# Altium footprint library Relay.PcbLib: 36 footprints (part 1 of 3)
Each footprint in its own frame and in the unit in brackets; x right, y up, seen from the top. Pads: shape width x height; smd on the part's side, far side on the other; paste and mask are expansions set on the pad; w line width, h text height; cw(c..) or ccw(c..) is an arc to the next point about the centre after c.
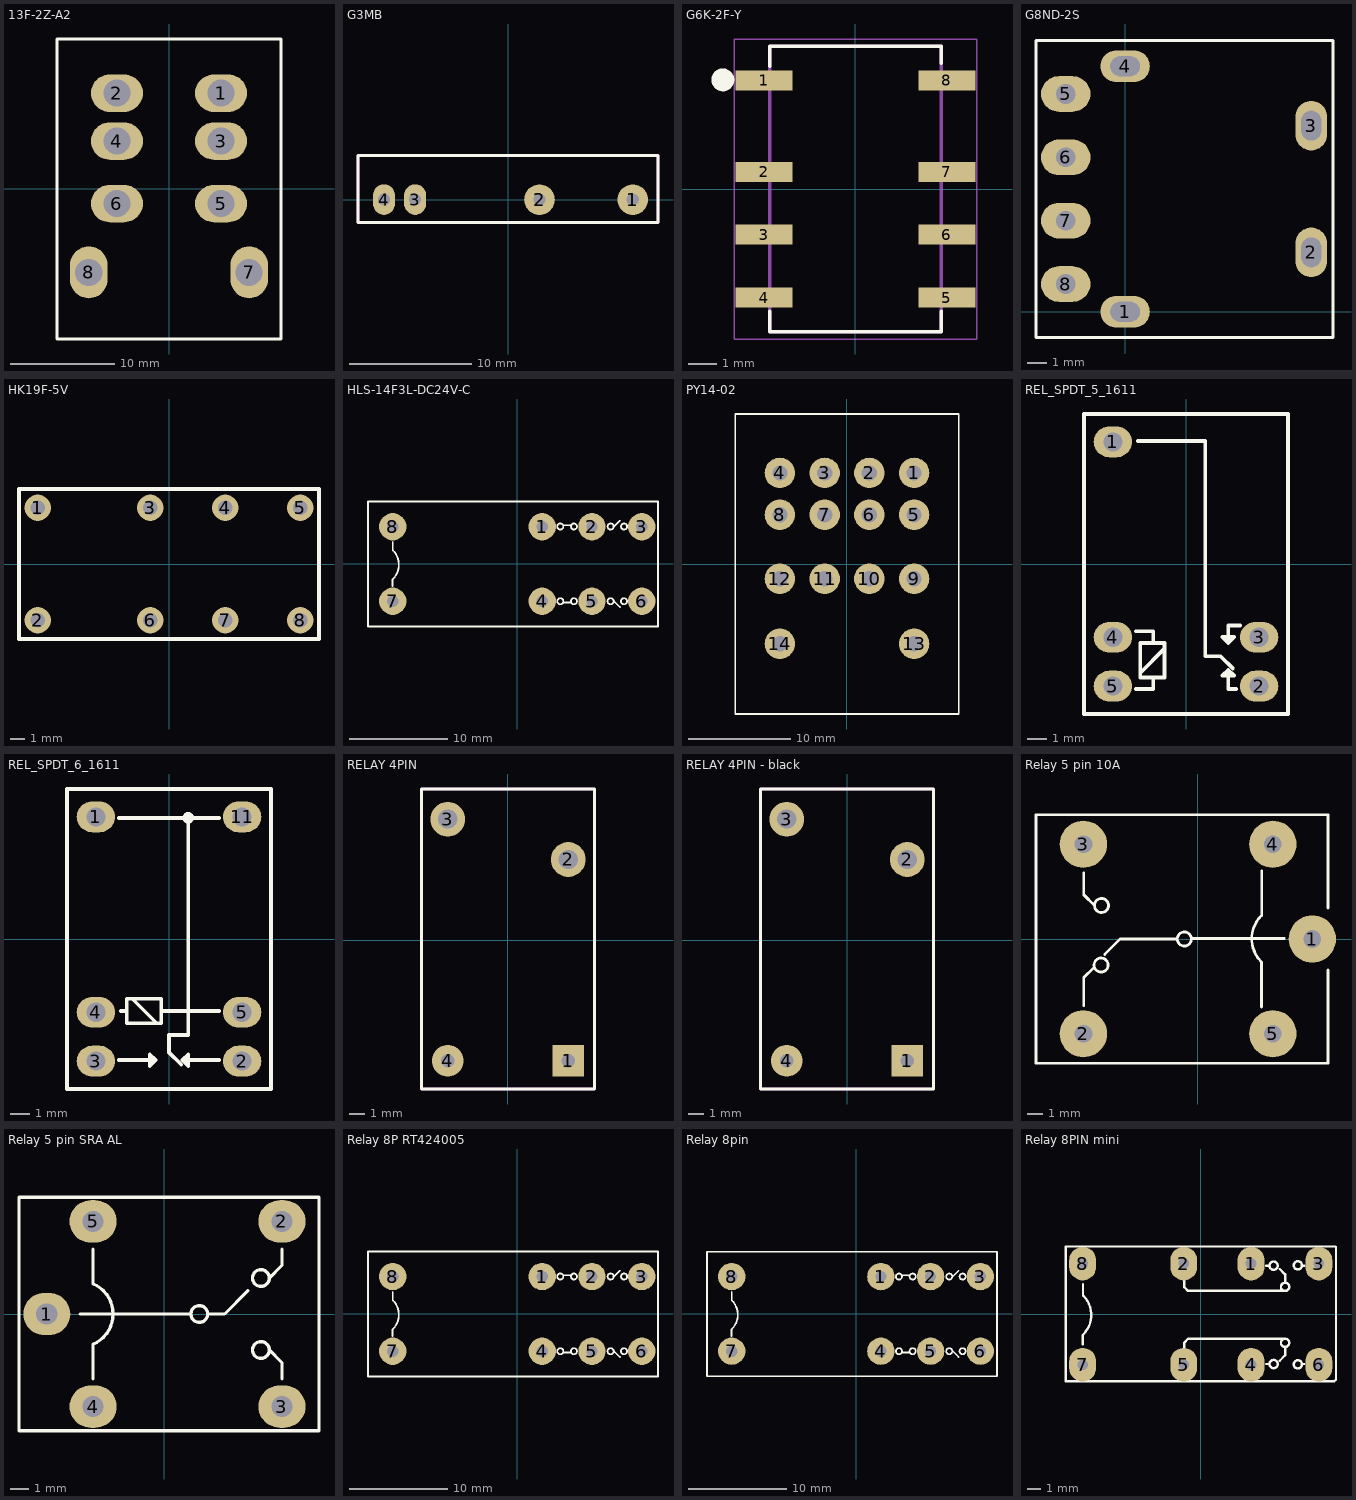
[diagram p0: the footprints below, top view; thin cyan lines are the x and y axes]

## 13F-2Z-A2 [mm]
pads (8):
  oval 5x3.6 hole 2.6: 1(5,9.2) 2(-5,9.2) 3(5,4.6) 4(-5,4.6) 5(5,-1.4) 6(-5,-1.4)
  oval 3.6x5 hole 2.6: 7(7.7,-8) 8(-7.7,-8)
Top Overlay:
  lines w0.254: -10.75,-14.4 10.75,-14.4 10.75,14.4 -10.75,14.4 -10.75,-14.4
3D body "18F-2Z-A2.stp": height 11.8, standoff 0, extent -10.8,-14.45 10.8,14.45
3D body "Omron - LY2-DC24 Relay.stp": height 47.22, standoff 5.52, extent -10.75,-14 10.75,14

## G3MB [mm] "24.5x20.5x5.5mm"
pads (4):
  round 2.5 hole 1: 1(10.16,0) 2(2.54,0)
  oval 1.8x2.5 hole 1: 3(-7.62,0) 4(-10.16,0)
Top Overlay:
  lines w0.254: -12.285,-1.885 12.215,-1.885 12.215,3.615 -12.285,3.615 -12.285,-1.885
Top Designator:
  text ".Designator" at -3.745,0.521 h1.52
Mechanical 15:
  lines w0.254: -12.285,-1.885 -12.285,3.615 12.215,3.615 12.215,-1.885 -12.285,-1.885
3D body "STD-EM-SR-00-00-03-01.SLDPRT": height 20.05, standoff -3.15, extent -12.16,-1.8 12.09,3.53

## G6K-2F-Y [mm] "G6K-2F-Y DC5 Omron Relay 1A 5V 8 PIN"
pads (8):
  rect 2x0.7 smd: 1(-3.2,3.8) 2(-3.2,0.6) 3(-3.2,-1.6) 4(-3.2,-3.8) 5(3.2,-3.8) 6(3.2,-1.6) 7(3.2,0.6) 8(3.2,3.8)
Top Overlay:
  circle w0.4: c-4.64,3.82 r0.2
  lines w0.127: -3,-4.28 -3,-5 3,-5 3,-4.28 ; -3,4.29 -3,5 3,5 3,4.4
Mechanical 13:
  lines w0.127: -3,-5 -3,5 3,5 3,-5 -3,-5
Mechanical 15:
  lines w0.05: -4.25,-5.25 -4.25,5.25 4.25,5.25 4.25,-5.25 -4.25,-5.25
3D body "G6K-2F-Y.stp": height 5.45, standoff 0, extent -3.9,-5.014 3.9,4.986

## G8ND-2S [mm]
pads (8):
  oval 2.5x1.6 hole 1 slot 1.5 at 0 deg: 1(0,0) 4(0,12.4)
  oval 1.6x2.5 hole 1 slot 1.5 at 90 deg: 2(9.4,3) 3(9.4,9.4)
  oval 2.5x1.8 hole 1: 5(-3,11) 6(-3,7.8) 7(-3,4.6) 8(-3,1.4)
Top Overlay:
  lines w0.15: -4.5,-1.3 10.5,-1.3 10.5,13.7 -4.5,13.7 -4.5,-1.3
Top Designator:
  text ".Designator" at -0.51,5.956 h1.52
3D body "g8nd-2.stp": height 13.5, standoff -3.5, extent -3.8,-0.6 10.2,13

## HK19F-5V [mil]
pads (8):
  round 70 hole 39.37: 1(-350,150) 2(-350,-150) 3(-50,150) 4(150,150) 5(350,150) 6(-50,-150) 7(150,-150) 8(350,-150)
Top Overlay:
  lines w10: -400,-200 400,-200 400,200 -400,200 -400,-200
Top Designator:
  text ".Designator" at -146.08,-13.54 h60
3D body "D2b V23105-A5 5VDC bk Relay (TE Connectivity).step": height 425.59, standoff -125.98, extent -397.63,-196.85 397.64,196.85

## HLS-14F3L-DC24V-C [mil]
height 300
pads (8):
  round 110 hole 45: 1(100,149.61) 2(300,149.61) 3(500,149.61) 4(100,-149.61) 5(300,-149.61) 6(500,-149.61) 7(-500,-149.61) 8(-500,149.61)
Top Overlay:
  circle w7: c428.76,-149.61 r12.24
  circle w7: c374.76,-149.61 r12.24
  circle w7: c227.76,-149.61 r12.24
  circle w7: c172.76,-149.61 r12.24
  circle w7: c172.76,150.39 r12.24
  circle w7: c227.76,150.39 r12.24
  circle w7: c374.76,150.39 r12.24
  circle w7: c428.76,150.39 r12.24
  lines w7: -501,-89.61 -501,-62.61 ; -500,-61.61 ccw(c-557.5,-3.11) -499,54.39 ; -500,55.39 -500,88.39 ; 187,-154.61 216,-154.61 ; 187,155.39 216,155.39 ; 388,-148.61 412,-172.61 ; 388,149.39 412,173.39 ; -599,-250.61 565.06,-250.61 565.06,250.39 -599,250.39 -599,-250.61
Top Designator:
  text ".Designator" at -163.05,-13.65 h60
3D body "Relay_TE_1-1415899-9_eec.STEP": height 620.09, standoff -140.14, extent -588.87,-252.86 552.87,247.14

## PY14-02 [mm]
pads (14):
  round 3 hole 1.5: 1(6.6,8.95) 2(2.2,8.95) 3(-2.2,8.95) 4(-6.6,8.95) 5(6.6,4.85) 6(2.2,4.85) 7(-2.2,4.85) 8(-6.6,4.85) 9(6.6,-1.45) 10(2.2,-1.45) 11(-2.2,-1.45) 12(-6.6,-1.45) 13(6.6,-7.85) 14(-6.6,-7.85)
Top Overlay:
  lines w0.15: -11,-14.75 -11,14.75 11,14.75 11,-14.75 -11,-14.75
3D body "18F-4Z-A2.stp": height 11.8, standoff 0, extent -10.8,-14.45 10.8,14.45
3D body "MY4.STEP": height 46.8, standoff 6.8, extent -10,-13.65 10,12.85

## REL_SPDT_5_1611 [mm] "RELAY, SPDT, 15.7X11X12mm, TRBS"
height 12
pads (5):
  oval 2x1.6 hole 1: 1(-3.8,6.35) 2(3.8,-6.35) 3(3.8,-3.81) 4(-3.8,-3.81) 5(-3.8,-6.35)
Top Overlay:
  lines w0.2: -2.6,-6.5 -1.7,-6.5 -1.7,-5.9 ; -2.6,-3.5 -1.7,-3.5 -1.7,-4.1 ; -2.5,6.4 1,6.4 1,-4.8 1.8,-4.8 2.435,-5.435 ; -2.379,-5.662 -1.109,-4.392 ; 2.6,-6.5 2.2,-6.5 2.2,-5.5 ; 2.8,-3.2 2.2,-3.2 2.2,-4.1 ; 2.2,-5.5 2.5,-5.8 1.9,-5.8 2.2,-5.5 ; 2.2,-4.1 1.9,-3.8 2.5,-3.8 2.2,-4.1 ; -5.3,-7.8 -5.3,7.8 5.3,7.8 5.3,-7.8 -5.3,-7.8 ; -2.379,-5.9 -1.109,-5.9 -1.109,-4.1 -2.379,-4.1 -2.379,-5.9
Top Designator:
  text ".Designator" at -3.71,-0.344 h1.52
3D body "User Library-HK4100F.step": height 11.81, standoff -2.75, extent -5.2,-7.7 5.2,7.7

## REL_SPDT_6_1611 [mm] "RELAY, SPDT, 15.7X11X12mm, HFD41, HK4100F, TRB"
height 12
pads (6):
  oval 2x1.6 hole 1: 1(-3.8,6.35) 2(3.8,-6.35) 3(-3.8,-6.35) 4(-3.8,-3.81) 5(3.8,-3.81) 11(3.8,6.35)
Top Overlay:
  circle w0.2: c1,6.3 r0.2
  lines w0.2: -2.6,-6.3 -0.7,-6.3 ; -2.6,6.3 2.6,6.3 ; -2.5,-3.744 -2.297,-3.744 ; -1.908,-3.109 -0.638,-4.379 ; -0.4,-3.744 2.6,-3.744 ; 0.635,-6.535 0,-5.9 0,-5 1,-5 1,6.3 ; 2.6,-6.3 0.7,-6.3 ; -0.7,-6.3 -1,-6 -1,-6.6 -0.7,-6.3 ; 0.7,-6.3 1,-6.6 1,-6 0.7,-6.3 ; -5.3,-7.8 -5.3,7.8 5.3,7.8 5.3,-7.8 -5.3,-7.8 ; -2.2,-4.379 -0.4,-4.379 -0.4,-3.109 -2.2,-3.109 -2.2,-4.379
Top Designator:
  text ".Designator" at -3.71,-0.344 h1.52
3D body "User Library-HK4100F.step": height 11.81, standoff -2.75, extent -5.2,-7.7 5.2,7.7

## RELAY 4PIN [mm]
pads (4):
  rect 2x2 hole 0.864: 1(3.8,-7.62)
  round 2.2 hole 1.2: 2(3.8,5.08) 3(-3.8,7.62)
  round 2 hole 0.864: 4(-3.8,-7.62)
Top Overlay:
  lines w0.2: -5.461,-9.398 -5.461,9.525 5.461,9.525 5.461,-9.398 -5.461,-9.398
Top Designator:
  lines w0.2: -5.461,-9.398 5.461,-9.398 5.461,9.525 -5.461,9.525 -5.461,-9.398
  text ".Designator" at -3.71,-0.28 h1.52
Mechanical 6:
  lines w0.2: -5.461,-9.398 5.461,-9.398 5.461,9.525 -5.461,9.525 -5.461,-9.398
3D body "RELAY_4_PIN__SONGLE_BLUE.STEP": height 15, standoff -2.3, extent -4.937,-8.937 5.063,9.063

## RELAY 4PIN - black [mm]
pads (4):
  rect 2x2 hole 0.864: 1(3.8,-7.62)
  round 2.2 hole 1.2: 2(3.8,5.08) 3(-3.8,7.62)
  round 2 hole 0.864: 4(-3.8,-7.62)
Top Overlay:
  lines w0.2: -5.461,-9.398 -5.461,9.525 5.461,9.525 5.461,-9.398 -5.461,-9.398
Top Designator:
  lines w0.2: -5.461,-9.398 5.461,-9.398 5.461,9.525 -5.461,9.525 -5.461,-9.398
  text ".Designator" at -3.71,-0.28 h1.52
Mechanical 6:
  lines w0.2: -5.461,-9.398 5.461,-9.398 5.461,9.525 -5.461,9.525 -5.461,-9.398
3D body "RELAY_4_PIN__SONGLE_BLACK.STEP": height 15, standoff -2.3, extent -4.937,-8.937 5.063,9.063

## Relay 5 pin 10A [mil] "Relay SPDT, 5 pin, 10A,W 650mil, L 800mil, H 800mil"
height 800
pads (5):
  round 120 hole 45: 1(290,0) 2(-290,-240) 3(-290,240) 4(190,240) 5(190,-240)
Top Overlay:
  circle w7: c-244.2,85 r17.8
  circle w7: c-245.2,-66 r17.8
  circle w7: c-34.2,0 r17.8
  lines w7: -289,-169 -289,-98 -263,-72 ; -289,168 -289,112 -262,85 ; -236,-39 -197,0 -54,0 ; -14,1 219,1 ; 160,-57 cw(c218.5,0.5) 161,59 ; 161,-172 161,-58 ; 162,60 162,173 ; 330,-78.78 330,-315 -410,-315 -410,315 330,315 330,78.78
Top Designator:
  text ".Designator" at -176.08,-13.54 h60
3D body "relay srd05vdc-sl-c.SLDPRT": height 594.88, standoff -173.23, extent -414.02,-295.28 334.01,295.27

## Relay 5 pin SRA AL [mil] "Relay SPDT, 5 pin, 10A,W 12.4mm, L 16mm, H 14.2mm"
height 559.06
pads (5):
  oval 100x90 hole 45: 1(-250,0) 2(250,196.85) 3(250,-196.85) 4(-151.57,-196.85) 5(-151.57,196.85)
Top Overlay:
  circle w7: c74.2,0 r17.8
  circle w7: c205.3,-76.5 r17.8
  circle w7: c205.3,76.5 r17.8
  lines w7: -179,0 54,0 ; -151.57,-137.8 -151.57,-64.17 ; -151.57,64.17 -151.57,137.8 ; -151.21,-64.2 ccw(c-179.12,-0.01) -151.21,64.19 ; 94,0 127.95,0 177.45,49.5 ; 223.1,-76.5 250.1,-103.5 250.1,-137.8 ; 223.1,76.5 250.1,103.5 250.1,137.8 ; -309.06,-248.03 328.74,-248.03 328.74,248.03 -309.06,248.03 -309.06,-248.03
Top Designator:
  text ".Designator" at -136.23,-13.54 h60
3D body "SRA-05VDC-CL.stp": height 535.63, standoff -192.72, extent -303.15,-242.13 307.08,242.12

## Relay 8P RT424005 [mil] "Reley DPDT, 8 pin, 8A, W500mil, L1100mil,H 950mil"
height 300
pads (8):
  round 110 hole 45: 1(100,150) 2(300,150) 3(500,150) 4(100,-150) 5(300,-150) 6(500,-150) 7(-500,-150) 8(-500,150)
Top Overlay:
  circle w7: c428.76,-150 r12.24
  circle w7: c374.76,-150 r12.24
  circle w7: c227.76,-150 r12.24
  circle w7: c172.76,-150 r12.24
  circle w7: c172.76,150 r12.24
  circle w7: c227.76,150 r12.24
  circle w7: c374.76,150 r12.24
  circle w7: c428.76,150 r12.24
  lines w7: -501,-90 -501,-63 ; -500,-62 ccw(c-557.5,-3.5) -499,54 ; -500,55 -500,88 ; 187,-155 216,-155 ; 187,155 216,155 ; 388,-149 412,-173 ; 388,149 412,173 ; -599,-251 565.06,-251 565.06,250 -599,250 -599,-251
Top Designator:
  text ".Designator" at -163.05,-14.04 h60
3D body "Relay_TE_1-1415899-9_eec.STEP": height 620.09, standoff -140.14, extent -588.87,-253.26 552.87,246.74

## Relay 8pin [mil] "Reley DPDT, 8 pin, 5A, W500mil, L1100mil,H 950mil"
height 300
pads (8):
  round 110 hole 45: 1(100,150) 2(300,150) 3(500,150) 4(100,-150) 5(300,-150) 6(500,-150) 7(-500,-150) 8(-500,150)
Top Overlay:
  circle w7: c428.76,150 r12.24
  circle w7: c374.76,150 r12.24
  circle w7: c227.76,150 r12.24
  circle w7: c172.76,150 r12.24
  circle w7: c172.76,-150 r12.24
  circle w7: c227.76,-150 r12.24
  circle w7: c374.76,-150 r12.24
  circle w7: c428.76,-150 r12.24
  lines w7: -501,-90 -501,-63 ; -500,-62 ccw(c-557.5,-3.5) -499,54 ; -500,55 -500,88 ; 187,-155 216,-155 ; 187,155 216,155 ; 388,-149 412,-173 ; 388,149 412,173 ; -599,-251 -599,250 567,250 567,-251 -599,-251
Top Designator:
  text ".Designator" at -162.08,-14.04 h60
3D body "Relay_Omron_G2RL14EDC24BYOMB_eec.STEP": height 618.15, standoff -137.8, extent -584.55,-248.43 549.31,243.7

## Relay 8PIN mini [mil] "Reley DPDT, 8 pin, 1A, W400mil, L800mil,H 300mil"
height 300
pads (8):
  oval 80x100 hole 32: 1(149.5,150) 2(-50.5,150) 3(350.5,150) 4(149.5,-150) 5(-50.5,-150) 6(350.5,-150) 7(-350.5,-150) 8(-350.5,150)
Top Overlay:
  circle w7: c250.26,81 r12.24
  circle w7: c288.26,-149 r12.24
  circle w7: c216.26,-148 r12.24
  circle w7: c250.26,-85 r12.24
  circle w7: c216.26,144 r12.24
  circle w7: c288.26,145 r12.24
  lines w7: -350.5,-89 -350.5,-62 ; -349.5,-61 ccw(c-407,-2.5) -348.5,55 ; -349.5,56 -349.5,89 ; -48.5,-105 -48.5,-84 -37.5,-73 248.5,-73 ; -48.5,108 -48.5,80 -37.5,69 248.5,69 ; 193.5,-148 201.5,-148 ; 193.5,144 201.5,144 ; 234.5,-138 250.5,-122 250.5,-99 ; 234.5,134 250.5,118 250.5,95 ; 302.5,-148 307.5,-148 ; 302.5,144 307.5,144 ; -400.5,-199 -400.5,201 399.5,201 401.5,199 401.5,-194 396.5,-199 -400.5,-199
Top Designator:
  text ".Designator" at -146.58,-13.29 h60
3D body "SW3dPS-DSY2Y.STEP": height 484.25, standoff -118.11, extent -409.95,-190 408.95,195.83